# Altium footprint library flight_controller_footprint_lib.PcbLib: 48 footprints (part 1 of 3)
Each footprint in its own frame and in the unit in brackets; x right, y up, seen from the top. Pads: shape width x height; smd on the part's side, far side on the other; paste and mask are expansions set on the pad; w line width, h text height; cw(c..) or ccw(c..) is an arc to the next point about the centre after c.
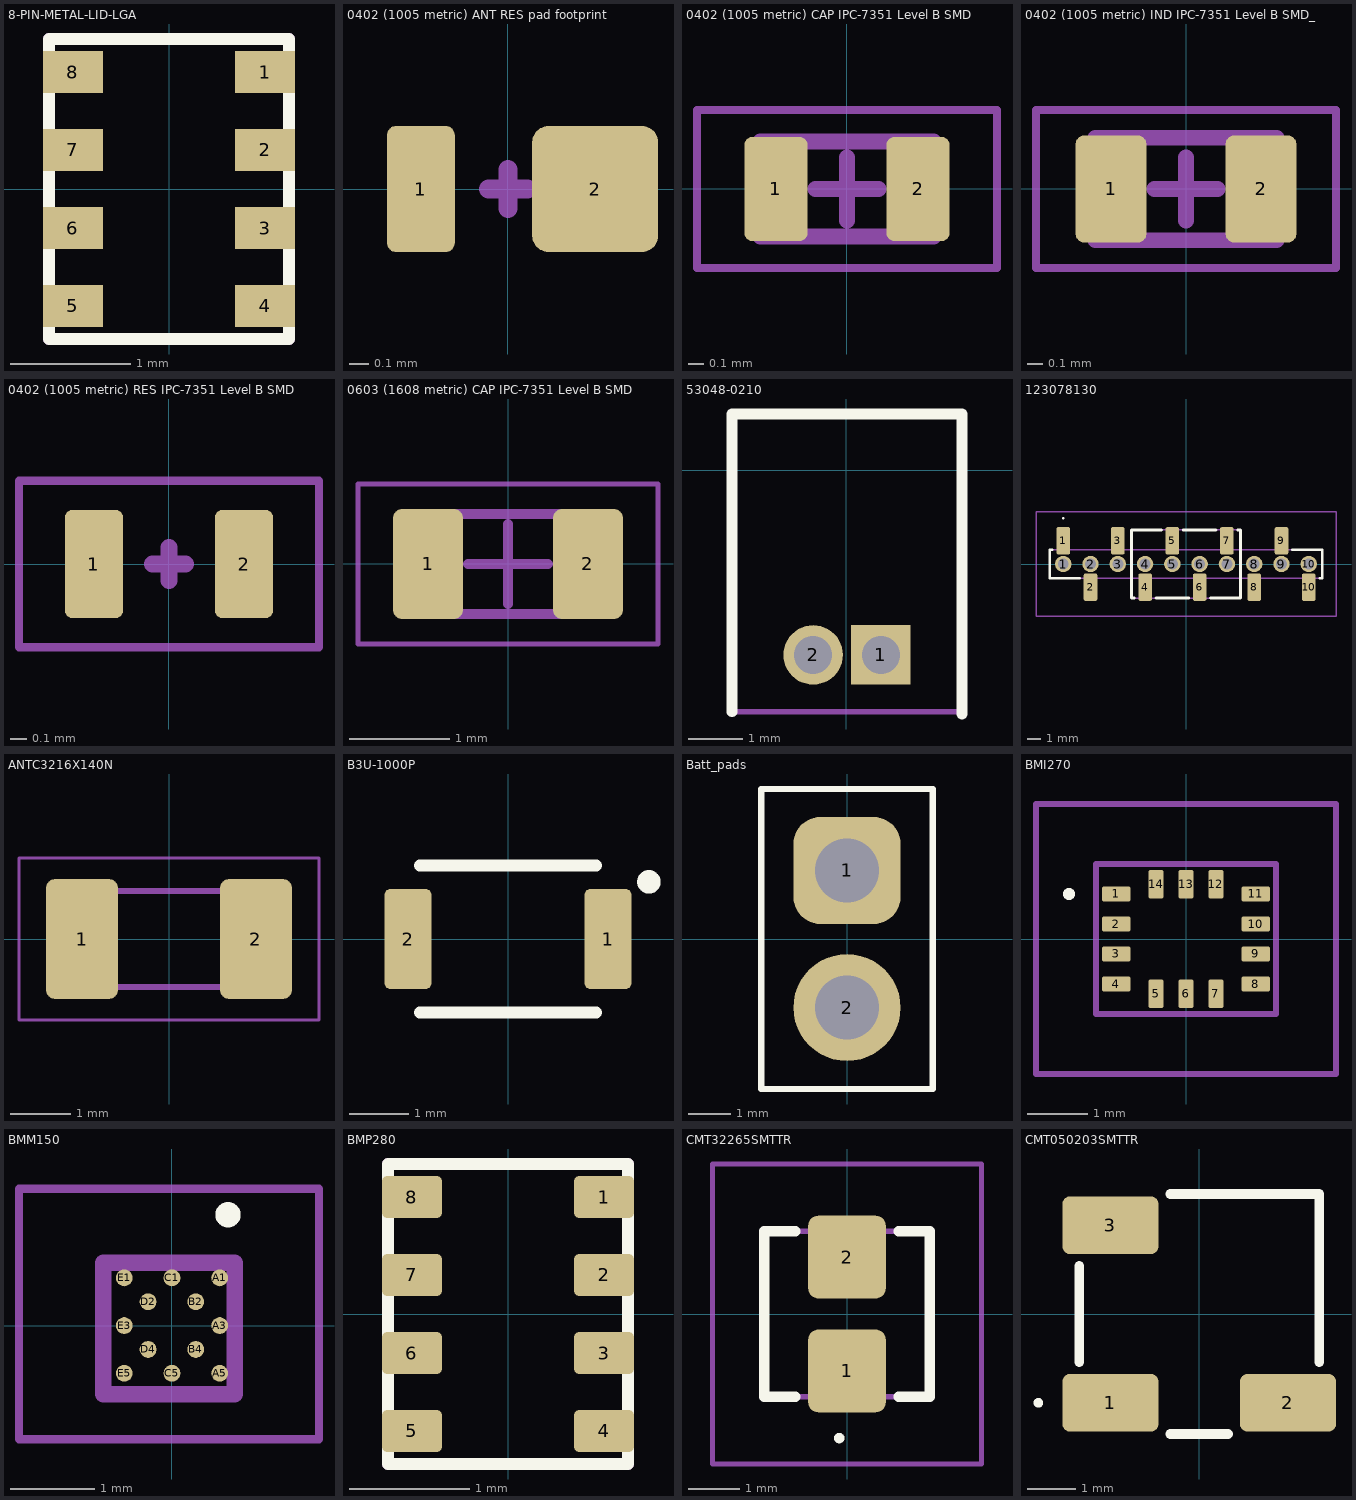
[diagram p0: the footprints below, top view; thin cyan lines are the x and y axes]

## 8-PIN-METAL-LID-LGA [mm]
pads (8):
  rect 0.5x0.35 smd: 1(0.8,0.975) 2(0.8,0.325) 3(0.8,-0.325) 4(0.8,-0.975) 5(-0.8,-0.975) 6(-0.8,-0.325) 7(-0.8,0.325) 8(-0.8,0.975)
Top Overlay:
  lines w0.1: -1,-1.25 -1,1.25 1,1.25 1,-1.25 -1,-1.25
Mechanical 13:
  lines w0.1: -1,-1.25 -1,1.25 1,1.25 1,-1.25 -1,-1.25
3D body "bmp280.stp": height 1, standoff 0, extent -1,-1.25 1,1.25

## 0402 (1005 metric) ANT RES pad footprint [mm] "0402 (1005 metric) for antenna selection."
height 0.4
pads (2):
  rrect25% 0.35x0.65 smd mask+0.1: 1(-0.45,0)
  rrect25% 0.65x0.65 smd mask+0.1: 2(0.45,0)
Top Assembly:
  lines w0.1: -0.1,0 0,0 ; 0,-0.1 0,0 ; 0,0.1 0,0 ; 0.1,0 0,0
Top Designator:
  text ".Designator" at -3.749,-0.25 h0.75

## 0402 (1005 metric) CAP IPC-7351 Level B SMD [mm] "0402 (1005 metric) footprint according to IPC-7351 Level B solder mask defined."
height 0.5
pads (2):
  rrect25% 0.4x0.66 smd: 1(-0.45,0) 2(0.45,0)
Top Assembly:
  lines w0.1: -0.2,0 0.2,0 ; 0,-0.2 0,0.2 ; -0.55,-0.3 -0.55,0.3 0.55,0.3 0.55,-0.3 -0.55,-0.3
Top Courtyard:
  lines w0.05: -0.95,-0.5 0.95,-0.5 0.95,0.5 -0.95,0.5 -0.95,-0.5
Top Designator:
  text ".Designator" at -3.749,-0.25 h0.75
3D body "CAP 0402 (1005 metric) IPC-7351 Level B.step": height 0.6, standoff 0, extent -0.55,-0.3 0.55,0.3

## 0402 (1005 metric) IND IPC-7351 Level B SMD_ [mm]
height 0.65
pads (2):
  rrect25% 0.45x0.68 smd: 1(-0.475,0) 2(0.475,0)
Top Assembly:
  lines w0.1: -0.2,0 0.2,0 ; 0,-0.2 0,0.2 ; -0.575,-0.325 -0.575,0.325 0.575,0.325 0.575,-0.325 -0.575,-0.325
Top Courtyard:
  lines w0.05: -0.95,-0.5 -0.95,0.5 0.95,0.5 0.95,-0.5 -0.95,-0.5
Top Designator:
  text ".Designator" at -3.749,-0.25 h0.75
3D body "0402 (1005 metric) IND IPC-7351 Level B SMD_.step": height 0.65, standoff 0, extent -0.575,-0.325 0.575,0.325

## 0402 (1005 metric) RES IPC-7351 Level B SMD [mm] "0402 (1005 metric) footprint according to IPC-7351 Level B solder mask defined."
height 0.4
pads (2):
  rrect25% 0.35x0.65 smd mask+0.1: 1(-0.45,0) 2(0.45,0)
Top Assembly:
  lines w0.1: -0.1,0 0,0 ; 0,-0.1 0,0 ; 0,0.1 0,0 ; 0.1,0 0,0
Top Courtyard:
  lines w0.05: -0.9,-0.5 0.9,-0.5 0.9,0.5 -0.9,0.5 -0.9,-0.5
Top Designator:
  text ".Designator" at -3.749,-0.25 h0.75
3D body: height 0.4, standoff 0, extent -0.345,-0.275 0.345,0.275
3D body: height 0.4, standoff 0, extent -0.525,-0.275 -0.345,0.275
3D body: height 0.4, standoff 0, extent 0.345,-0.275 0.525,0.275

## 0603 (1608 metric) CAP IPC-7351 Level B SMD [mm]
height 1
pads (2):
  rrect25% 0.7x1.1 smd: 1(-0.8,0) 2(0.8,0)
Top Assembly:
  lines w0.1: -0.4,0 0.4,0 ; 0,-0.4 0,0.4 ; -0.9,-0.5 -0.9,0.5 0.9,0.5 0.9,-0.5 -0.9,-0.5
Top Courtyard:
  lines w0.05: -1.5,-0.8 -1.5,0.8 1.5,0.8 1.5,-0.8 -1.5,-0.8
3D body "0603 CAP.step": height 1, standoff 0, extent -0.9,-0.5 0.9,0.5

## 53048-0210 [mm] "Molex 2 pin 1.25mm pitch"
pads (2):
  rect 1.1x1.1 hole 0.7: 1(0.635,-3.409)
  round 1.1 hole 0.7: 2(-0.615,-3.409)
Top Overlay:
  lines w0.2: -2.115,-4.459 -2.115,1.041 2.135,1.041 2.135,-4.5
Top Courtyard:
  lines w0.1: -2.115,-4.459 2.135,-4.459 2.135,1.041 -2.115,1.041 -2.115,-4.459
Top Designator:
  text ".Designator" at -3.739,-1.979 h0.75
3D body "53048-0210.stp": height 3.6, standoff -2.2, extent -2.125,-4.525 2.125,0.975

## 123078130 [mm] "10 Pos 2mm SMD connector"
pads (20):
  round 1.2 / inner round 0.4 / far side round 1.2 hole 0.8: 1(-9,0) 2(-7,0) 3(-5,0) 4(-3,0) 5(-1,0) 6(1,0) 7(3,0) 8(5,0) 9(7,0) 10(9,0)
  rrect25% 1x2 smd: 1(-9,1.7) 2(-7,-1.7) 3(-5,1.7) 4(-3,-1.7) 5(-1,1.7) 6(1,-1.7) 7(3,1.7) 8(5,-1.7) 9(7,1.7) 10(9,-1.7)
Top Overlay:
  lines w0.1: -9,3.3 cw(c-9,3.35) -9,3.4 cw(c-9,3.35) -9,3.3
  lines w0.2: -9.8,1.05 -10,1.05 -10,-1.05 -7.8,-1.05 ; -3.8,-2.5 -4,-2.5 -4,2.5 -1.8,2.5 ; -2.2,-2.5 0.2,-2.5 ; -0.2,2.5 2.2,2.5 ; 1.8,-2.5 4,-2.5 4,-1 ; 3.8,2.5 4,2.5 4,-1.2 ; 7.8,1.05 10,1.05 10,-1.05 9.8,-1.05
Top Assembly:
  lines w0.1: -10,-1.05 -10,1.05 10,1.05 10,-1.05 -10,-1.05 ; -4,-2.5 -4,2.5 4,2.5 4,-2.5 -4,-2.5
Top Courtyard:
  lines w0.1: -11,-3.85 11,-3.85 11,3.85 -11,3.85 -11,-3.85
Top Designator:
  text ".Designator" at -3.749,-0.25 h0.75
Bottom Designator:
  text ".Designator" at -3.749,-0.25 h0.75
3D body "1-2307813-0.stp": height 4.65, standoff -0.03, extent -10,-2.33 10,2.33

## ANTC3216X140N [mm]
pads (2):
  rrect25% 1.2x2 smd: 1(-1.45,0) 2(1.45,0)
Top Assembly:
  lines w0.1: -1.6,0.2 -1,0.8 ; -1.6,-0.8 -1.6,0.8 1.6,0.8 1.6,-0.8 -1.6,-0.8
Top Courtyard:
  lines w0.05: -2.5,-1.35 -2.5,1.35 2.5,1.35 2.5,-1.35 -2.5,-1.35
Top Designator:
  text ".Designator" at -3.749,-0.25 h0.75
3D body "2450AT18B0100001E edited.step": height 1.4, standoff 0, extent -1.6,-0.8 1.6,0.8

## B3U-1000P [mm]
pads (2):
  rrect25% 0.8x1.7 smd: 1(1.7,0) 2(-1.7,0)
Top Overlay:
  circle w0.2: c2.395,0.971 r0.1
  lines w0.2: -1.5,-1.25 1.5,-1.25 ; -1.5,1.25 1.5,1.25
Top Designator:
  text ".Designator" at -7.421,-0.508 h1.52
Bottom Designator:
  text ".Designator" at -7.421,-0.508 h1.52
3D body "B3U-1000P.stp": height 1.6, standoff 0, extent -2,-1.25 2,1.25

## Batt_pads [mm]
pads (2):
  rrect50% 2.5x2.5 hole 1.5 mask+0.1: 1(0,1.6)
  round 2.5 hole 1.5 mask+0.1: 2(0,-1.6)
Top Overlay:
  lines w0.15: -2,-3.5 -1.5,-3.5 2,-3.5 2,3.5 -1.5,3.5 -2,3.5 -2,-3.5
Top Designator:
  text ".Designator" at -7.618,-0.508 h1.52
Bottom Designator:
  text ".Designator" at -7.618,-0.508 h1.52

## BMI270 [mm]
pads (14):
  rrect25% 0.475x0.25 smd mask+0.1: 1(-1.163,0.75) 2(-1.163,0.25) 3(-1.163,-0.25) 4(-1.163,-0.75) 8(1.162,-0.75) 9(1.162,-0.25) 10(1.162,0.25) 11(1.162,0.75)
  rrect25% 0.25x0.475 smd mask+0.1: 5(-0.5,-0.913) 6(0,-0.913) 7(0.5,-0.913) 12(0.5,0.913) 13(0,0.913) 14(-0.5,0.913)
Top Overlay:
  lines w0.1: -2,0.75 ccw(c-1.95,0.75) -1.9,0.75 ccw(c-1.95,0.75) -2,0.75
Top Assembly:
  lines w0.1: -1.5,-1.25 1.5,-1.25 1.5,1.25 -1.5,1.25 -1.5,-1.25
Top Courtyard:
  lines w0.1: -2.5,-2.25 2.5,-2.25 2.5,2.25 -2.5,2.25 -2.5,-2.25
Top Designator:
  text ".Designator" at -3.749,-0.25 h0.75
3D body "BMI270.stp": height 0.85, standoff 0.02, extent -1.5,-1.25 1.5,1.25

## BMM150 [mm]
pads (12):
  round 0.2 smd: A1(0.566,0.566) A3(0.566,0) A5(0.566,-0.566) B2(0.283,0.283) B4(0.283,-0.283) C1(0,0.566) C5(0,-0.566) D2(-0.283,0.283) D4(-0.283,-0.283) E1(-0.566,0.566) E3(-0.566,0) E5(-0.566,-0.566)
Top Overlay:
  lines w0.2: 0.665,1.265 cw(c0.665,1.315) 0.665,1.365 ; 0.665,1.265 ccw(c0.665,1.315) 0.665,1.365 ; 0.665,1.265 cw(c0.665,1.315) 0.665,1.365
Top Assembly:
  lines w0.2: -0.815,-0.815 0.745,-0.815 0.745,0.745 -0.815,0.745 -0.815,-0.815
Top Courtyard:
  lines w0.1: -1.815,-1.35 -1.815,1.625 1.745,1.625 1.745,-1.35 -1.815,-1.35
Top Designator:
  text ".Designator" at -3.784,-0.112 h0.75
3D body "BMM150.stp": height 0.6, standoff 0, extent -0.805,-0.805 0.755,0.755

## BMP280 [mm]
pads (8):
  rrect25% 0.5x0.35 smd: 1(0.8,0.975) 2(0.8,0.325) 3(0.8,-0.325) 4(0.8,-0.975) 5(-0.8,-0.975) 6(-0.8,-0.325) 7(-0.8,0.325) 8(-0.8,0.975)
Top Overlay:
  lines w0.1: -1,-1.25 1,-1.25 1,1.25 -1,1.25 -1,-1.25
Mechanical 13:
  lines w0.1: -1,-1.25 1,-1.25 1,1.25 -1,1.25 -1,-1.25
3D body "bmp280.stp": height 1, standoff 0, extent -1,-1.25 1,1.25

## CMT32265SMTTR [mm]
pads (2):
  rrect25% 1.5x1.6 smd: 1(0,-1.1) 2(0,1.1)
Top Overlay:
  lines w0.1: -0.2,-2.4 cw(c-0.15,-2.4) -0.1,-2.4 cw(c-0.15,-2.4) -0.2,-2.4
  lines w0.2: -1,-1.6 -1.6,-1.6 -1.6,1.6 -1,1.6 ; 1,-1.6 1.6,-1.6 1.6,1.6 1,1.6
Top Assembly:
  lines w0.1: -1.6,-1.6 1.6,-1.6 1.6,1.6 -1.6,1.6 -1.6,-1.6
Top Courtyard:
  lines w0.1: -2.6,-2.9 2.6,-2.9 2.6,2.9 -2.6,2.9 -2.6,-2.9
Top Designator:
  text ".Designator" at -3.749,-0.25 h0.75
3D body "CMT-322-65-SMT-TR.stp": height 2, standoff -0.01, extent -1.622,-1.6 1.778,1.6

## CMT050203SMTTR [mm]
pads (3):
  rrect25% 2x1.2 smd: 1(-1.85,-1.85) 2(1.85,-1.85) 3(-1.85,1.85)
Top Overlay:
  lines w0.1: -3.4,-1.85 cw(c-3.35,-1.85) -3.3,-1.85 cw(c-3.35,-1.85) -3.4,-1.85
  lines w0.2: -2.5,-1 -2.5,1 ; -0.6,-2.5 0.6,-2.5 ; -0.6,2.5 2.5,2.5 2.5,-1
Top Designator:
  text ".Designator" at -3.749,0.163 h0.75
3D body "CMT-0502-03-SMT-TR.stp": height 2, standoff 0, extent -2.5,-1.575 2.5,3.425